# Altium footprint library SYNCBOX_TST.PcbLib: 267 footprints (part 5 of 17)
Each footprint in its own frame and in the unit in brackets; x right, y up, seen from the top. Pads: shape width x height; smd on the part's side, far side on the other; paste and mask are expansions set on the pad; w line width, h text height; cw(c..) or ccw(c..) is an arc to the next point about the centre after c.
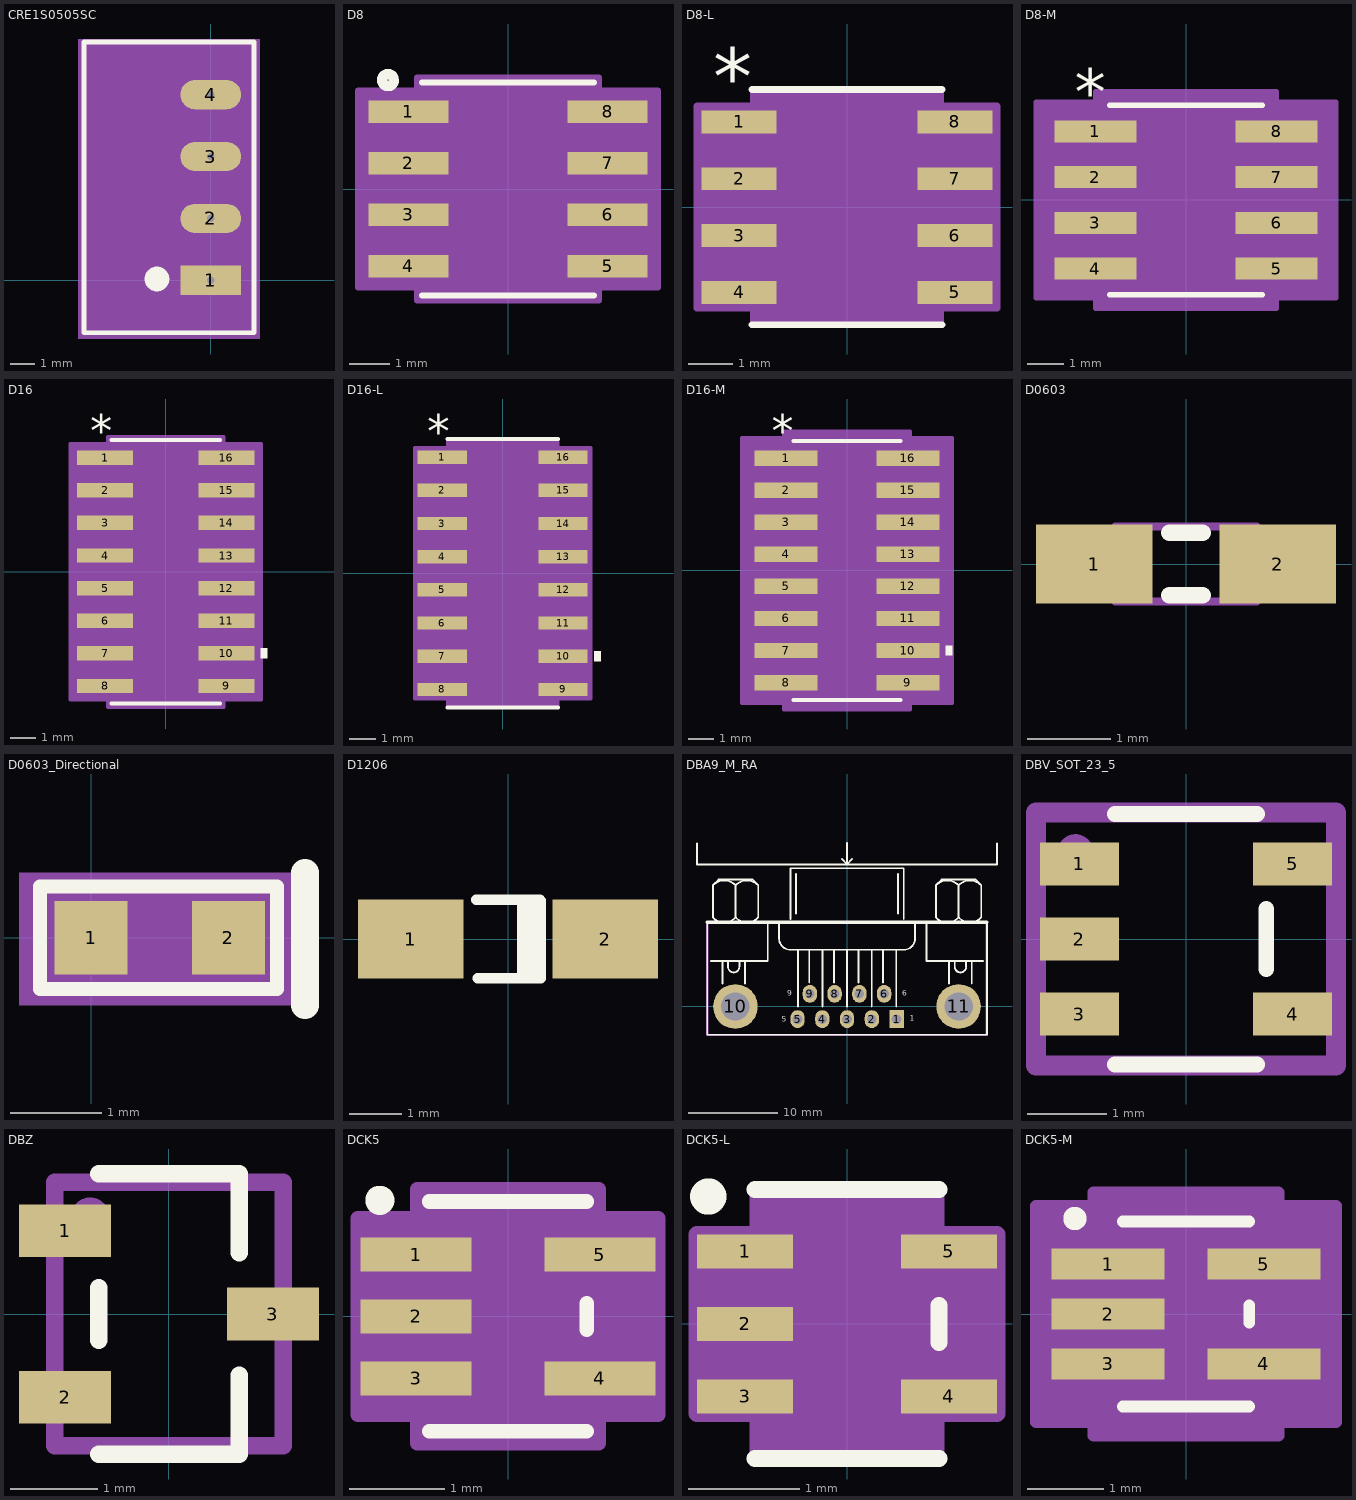
[diagram p4: the footprints below, top view; thin cyan lines are the x and y axes]

## CRE1S0505SC [mm]
pads (4):
  rect 2.5x1.2 hole 0.3 square: 1(0,0)
  oval 2.5x1.2 hole 0.3 square: 2(0,2.54) 3(0,5.08) 4(0,7.62)
Top Overlay:
  circle w0.508: c-2.21,0.051 r0.254
  lines w0.2: -5.207,-2.159 1.778,-2.159 1.778,9.779 -5.207,9.779 -5.207,-2.159
Mechanical 15:
  rectangle: -5.461,-2.413 2.032,9.906
3D body "mps_dcdc_cre1s_sc_a.step": height 10.19, standoff -3.91, extent -4.953,-2.209 1.167,9.321

## D8 [mil]
pads (8):
  rect 78x22 smd paste+0 mask+0: 1(-97,75) 2(-97,25) 3(-97,-25) 4(-97,-75) 5(97,-75) 6(97,-25) 7(97,25) 8(97,75)
Top Overlay:
  lines w6: -83.5,-103.5 83.5,-103.5 ; -83.5,103.5 83.5,103.5
  lines w10: -111.62,108.61 ccw(c-116.83,106) -111,106
Mechanical 13:
  lines w0: -12,98.5 ccw(c0,98.5) 12,98.5
  lines w1: -122,-85 -78.5,-85 -78.5,-65 -122,-65 -122,-85 ; -122,-35 -78.5,-35 -78.5,-15 -122,-15 -122,-35 ; -122,15 -78.5,15 -78.5,35 -122,35 -122,15 ; -122,65 -78.5,65 -78.5,85 -122,85 -122,65 ; -78.5,-98.5 -78.5,98.5 78.5,98.5 78.5,-98.5 -78.5,-98.5 ; 78.5,-85 122,-85 122,-65 78.5,-65 78.5,-85 ; 78.5,-35 122,-35 122,-15 78.5,-15 78.5,-35 ; 78.5,15 122,15 122,35 78.5,35 78.5,15 ; 78.5,65 122,65 122,85 78.5,85 78.5,65
  text "*" at -76,45.5 h50
Mechanical 15:
  region: -88.5,-96 -146,-96 -146,96 -88.5,96 -88.5,108.5 88.5,108.5 88.5,96 146,96 146,-96 88.5,-96 88.5,-108.5 -88.5,-108.5
  lines w6: -146,-96 -88.5,-96 -88.5,-108.5 88.5,-108.5 88.5,-96 146,-96 146,96 88.5,96 88.5,108.5 -88.5,108.5 -88.5,96 -146,96 -146,-96
3D body: height 10, standoff 0, extent 0,0 10,10
3D body "D8.step": height 69.09, standoff 0, extent -122,-98.5 122.01,98.51

## D8-L [mil]
pads (8):
  rect 66x20 smd paste+0 mask+0: 1(-95,75) 2(-95,25) 3(-95,-25) 4(-95,-75) 5(95,-75) 6(95,-25) 7(95,25) 8(95,75)
Top Overlay:
  lines w6: -83.5,-103.5 83.5,-103.5 ; -83.5,103.5 83.5,103.5
  text "*" at -117.5,90 h50
Mechanical 13:
  lines w0: -12,98.5 ccw(c0,98.5) 12,98.5
  lines w1: -122,-85 -122,-65 -78.5,-65 -78.5,-85 -122,-85 ; -122,-35 -122,-15 -78.5,-15 -78.5,-35 -122,-35 ; -122,15 -122,35 -78.5,35 -78.5,15 -122,15 ; -122,65 -122,85 -78.5,85 -78.5,65 -122,65 ; -78.5,-98.5 78.5,-98.5 78.5,98.5 -78.5,98.5 -78.5,-98.5 ; 78.5,-85 78.5,-65 122,-65 122,-85 78.5,-85 ; 78.5,-35 78.5,-15 122,-15 122,-35 78.5,-35 ; 78.5,15 78.5,35 122,35 122,15 78.5,15 ; 78.5,65 78.5,85 122,85 122,65 78.5,65
  text "*" at -76,45.5 h50
Mechanical 15:
  region: -82.5,-89 -132,-89 -132,89 -82.5,89 -82.5,102.5 82.5,102.5 82.5,89 132,89 132,-89 82.5,-89 82.5,-102.5 -82.5,-102.5
  lines w6: -132,-89 -132,89 -82.5,89 -82.5,102.5 82.5,102.5 82.5,89 132,89 132,-89 82.5,-89 82.5,-102.5 -82.5,-102.5 -82.5,-89 -132,-89
3D body "D8-L.step": height 69.09, standoff 0, extent -122,-98.5 122.01,98.51
3D body: height 10, standoff 0, extent 0,0 10,10

## D8-M [mil]
pads (8):
  rect 90x24 smd paste+0 mask+0: 1(-99,75) 2(-99,25) 3(-99,-25) 4(-99,-75) 5(99,-75) 6(99,-25) 7(99,25) 8(99,75)
Top Overlay:
  lines w6: -83.5,-103.5 83.5,-103.5 ; -83.5,103.5 83.5,103.5
  text "*" at -121.5,94 h50
Mechanical 13:
  lines w0: -12,98.5 ccw(c0,98.5) 12,98.5
  lines w1: -122,-85 -78.5,-85 -78.5,-65 -122,-65 -122,-85 ; -122,-35 -78.5,-35 -78.5,-15 -122,-15 -122,-35 ; -122,15 -78.5,15 -78.5,35 -122,35 -122,15 ; -122,65 -78.5,65 -78.5,85 -122,85 -122,65 ; -78.5,-98.5 -78.5,98.5 78.5,98.5 78.5,-98.5 -78.5,-98.5 ; 78.5,-85 122,-85 122,-65 78.5,-65 78.5,-85 ; 78.5,-35 122,-35 122,-15 78.5,-15 78.5,-35 ; 78.5,15 122,15 122,35 78.5,35 78.5,15 ; 78.5,65 122,65 122,85 78.5,85 78.5,65
  text "*" at -76,45.5 h50
Mechanical 15:
  region: -98.5,-107 -164,-107 -164,107 -98.5,107 -98.5,118.5 98.5,118.5 98.5,107 164,107 164,-107 98.5,-107 98.5,-118.5 -98.5,-118.5
  lines w6: -164,-107 -98.5,-107 -98.5,-118.5 98.5,-118.5 98.5,-107 164,-107 164,107 98.5,107 98.5,118.5 -98.5,118.5 -98.5,107 -164,107 -164,-107
3D body: height 10, standoff 0, extent 0,0 10,10
3D body "D8-M.step": height 69.09, standoff 0, extent -122,-98.5 122.01,98.51

## D16 [mil]
pads (16):
  rect 86x22 smd paste+0 mask+0: 1(-93,175) 2(-93,125) 3(-93,75) 4(-93,25) 5(-93,-25) 6(-93,-75) 7(-93,-125) 8(-93,-175) 9(93,-175) 10(93,-125) 11(93,-75) 12(93,-25) 13(93,25) 14(93,75) 15(93,125) 16(93,175)
Top Overlay:
  region: 146,-117.5 156,-117.5 156,-132.5 146,-132.5
  lines w6: -83.5,-202 83.5,-202 ; -83.5,202 83.5,202
  text "*" at -115.5,192 h50
Mechanical 13:
  lines w0: -12,197 ccw(c0,197) 12,197
  lines w1: -122,-185 -122,-165 -78.5,-165 -78.5,-185 -122,-185 ; -122,-135 -122,-115 -78.5,-115 -78.5,-135 -122,-135 ; -122,-85 -122,-65 -78.5,-65 -78.5,-85 -122,-85 ; -122,-35 -122,-15 -78.5,-15 -78.5,-35 -122,-35 ; -122,15 -122,35 -78.5,35 -78.5,15 -122,15 ; -122,65 -122,85 -78.5,85 -78.5,65 -122,65 ; -122,115 -122,135 -78.5,135 -78.5,115 -122,115 ; -122,165 -122,185 -78.5,185 -78.5,165 -122,165 ; -78.5,-197 78.5,-197 78.5,197 -78.5,197 -78.5,-197 ; 78.5,-185 78.5,-165 122,-165 122,-185 78.5,-185 ; 78.5,-135 78.5,-115 122,-115 122,-135 78.5,-135 ; 78.5,-85 78.5,-65 122,-65 122,-85 78.5,-85 ; 78.5,-35 78.5,-15 122,-15 122,-35 78.5,-35 ; 78.5,15 78.5,35 122,35 122,15 78.5,15 ; 78.5,65 78.5,85 122,85 122,65 78.5,65 ; 78.5,115 78.5,135 122,135 122,115 78.5,115 ; 78.5,165 78.5,185 122,185 122,165 78.5,165
  text "*" at -76,144 h50
Mechanical 15:
  region: -88.5,-196 -146,-196 -146,196 -88.5,196 -88.5,207 88.5,207 88.5,196 146,196 146,-196 88.5,-196 88.5,-207 -88.5,-207
  lines w6: -146,-196 -146,196 -88.5,196 -88.5,207 88.5,207 88.5,196 146,196 146,-196 88.5,-196 88.5,-207 -88.5,-207 -88.5,-196 -146,-196
3D body: height 10, standoff 0, extent 0,0 10,10
3D body "D16.stp": height 69.09, standoff 0, extent -122.01,-197.01 122.01,197.01

## D16-L [mil]
pads (16):
  rect 74x20 smd paste+0 mask+0: 1(-91,175) 2(-91,125) 3(-91,75) 4(-91,25) 5(-91,-25) 6(-91,-75) 7(-91,-125) 8(-91,-175) 9(91,-175) 10(91,-125) 11(91,-75) 12(91,-25) 13(91,25) 14(91,75) 15(91,125) 16(91,175)
Top Overlay:
  region: 138,-117.5 148,-117.5 148,-132.5 138,-132.5
  lines w6: -83.5,-202 83.5,-202 ; -83.5,202 83.5,202
  text "*" at -113.5,190 h50
Mechanical 13:
  lines w0: -12,197 ccw(c0,197) 12,197
  lines w1: -122,-185 -122,-165 -78.5,-165 -78.5,-185 -122,-185 ; -122,-135 -122,-115 -78.5,-115 -78.5,-135 -122,-135 ; -122,-85 -122,-65 -78.5,-65 -78.5,-85 -122,-85 ; -122,-35 -122,-15 -78.5,-15 -78.5,-35 -122,-35 ; -122,15 -122,35 -78.5,35 -78.5,15 -122,15 ; -122,65 -122,85 -78.5,85 -78.5,65 -122,65 ; -122,115 -122,135 -78.5,135 -78.5,115 -122,115 ; -122,165 -122,185 -78.5,185 -78.5,165 -122,165 ; -78.5,-197 78.5,-197 78.5,197 -78.5,197 -78.5,-197 ; 78.5,-185 78.5,-165 122,-165 122,-185 78.5,-185 ; 78.5,-135 78.5,-115 122,-115 122,-135 78.5,-135 ; 78.5,-85 78.5,-65 122,-65 122,-85 78.5,-85 ; 78.5,-35 78.5,-15 122,-15 122,-35 78.5,-35 ; 78.5,15 78.5,35 122,35 122,15 78.5,15 ; 78.5,65 78.5,85 122,85 122,65 78.5,65 ; 78.5,115 78.5,135 122,135 122,115 78.5,115 ; 78.5,165 78.5,185 122,185 122,165 78.5,165
  text "*" at -76,144 h50
Mechanical 15:
  region: -82.5,-189 -132,-189 -132,189 -82.5,189 -82.5,201 82.5,201 82.5,189 132,189 132,-189 82.5,-189 82.5,-201 -82.5,-201
  lines w6: -132,-189 -132,189 -82.5,189 -82.5,201 82.5,201 82.5,189 132,189 132,-189 82.5,-189 82.5,-201 -82.5,-201 -82.5,-189 -132,-189
3D body "D16-L.stp": height 69.09, standoff 0, extent -122,-197 122.01,197.01
3D body: height 10, standoff 0, extent 0,0 10,10

## D16-M [mil]
pads (16):
  rect 98x24 smd paste+0 mask+0: 1(-95,175) 2(-95,125) 3(-95,75) 4(-95,25) 5(-95,-25) 6(-95,-75) 7(-95,-125) 8(-95,-175) 9(95,-175) 10(95,-125) 11(95,-75) 12(95,-25) 13(95,25) 14(95,75) 15(95,125) 16(95,175)
Top Overlay:
  region: 154,-117.5 164,-117.5 164,-132.5 154,-132.5
  lines w6: -83.5,-202 83.5,-202 ; -83.5,202 83.5,202
  text "*" at -117.5,194 h50
Mechanical 13:
  lines w0: -12,197 ccw(c0,197) 12,197
  lines w1: -122,-185 -78.5,-185 -78.5,-165 -122,-165 -122,-185 ; -122,-135 -78.5,-135 -78.5,-115 -122,-115 -122,-135 ; -122,-85 -78.5,-85 -78.5,-65 -122,-65 -122,-85 ; -122,-35 -78.5,-35 -78.5,-15 -122,-15 -122,-35 ; -122,15 -78.5,15 -78.5,35 -122,35 -122,15 ; -122,65 -78.5,65 -78.5,85 -122,85 -122,65 ; -122,115 -78.5,115 -78.5,135 -122,135 -122,115 ; -122,165 -78.5,165 -78.5,185 -122,185 -122,165 ; -78.5,-197 -78.5,197 78.5,197 78.5,-197 -78.5,-197 ; 78.5,-185 122,-185 122,-165 78.5,-165 78.5,-185 ; 78.5,-135 122,-135 122,-115 78.5,-115 78.5,-135 ; 78.5,-85 122,-85 122,-65 78.5,-65 78.5,-85 ; 78.5,-35 122,-35 122,-15 78.5,-15 78.5,-35 ; 78.5,15 122,15 122,35 78.5,35 78.5,15 ; 78.5,65 122,65 122,85 78.5,85 78.5,65 ; 78.5,115 122,115 122,135 78.5,135 78.5,115 ; 78.5,165 122,165 122,185 78.5,185 78.5,165
  text "*" at -76,144 h50
Mechanical 15:
  region: -98.5,-207 -164,-207 -164,207 -98.5,207 -98.5,217 98.5,217 98.5,207 164,207 164,-207 98.5,-207 98.5,-217 -98.5,-217
  lines w6: -164,-207 -98.5,-207 -98.5,-217 98.5,-217 98.5,-207 164,-207 164,207 98.5,207 98.5,217 -98.5,217 -98.5,207 -164,207 -164,-207
3D body: height 10, standoff 0, extent 0,0 10,10
3D body "D16-M.stp": height 69.09, standoff 0, extent -122,-197 122.01,197.01

## D0603 [mm]
height 0.8
pads (2):
  rect 1.4x0.95 smd: 1(-1.1,0) 2(1.1,0)
Top Overlay:
  lines w0.2: -0.2,-0.375 0.2,-0.375 ; -0.2,0.375 0.2,0.375
Mechanical 13:
  lines w0.1: -0.85,-0.45 0.85,-0.45 0.85,0.45 -0.85,0.45 -0.85,-0.45
3D body: height 0.55, standoff 0, extent -0.85,-0.45 0.85,0.45

## D0603_Directional [mm] "0603 Case Diode"
pads (2):
  rect 0.8x0.8 smd: 1(0,0) 2(1.5,0)
Top Overlay:
  lines w0.152: -0.559,-0.559 -0.559,0.559 2.032,0.559 2.032,-0.559 -0.559,-0.559
  lines w0.305: 2.337,-0.737 2.337,0.711
Mechanical 15:
  rectangle: -0.787,-0.737 2.489,0.711
Mechanical 29:
  text ".Designator" at -0.508,-0.229 h1.52
3D body "APT1608.STEP": height 0.75, standoff 0, extent -0.09,-0.374 1.521,0.426

## D1206 [mm]
height 1.85
pads (2):
  rect 2x1.5 smd: 1(-1.85,0) 2(1.85,0)
Top Overlay:
  lines w0.2: -0.6,0.75 0.6,0.75 0.625,0.725 0.625,-0.75 -0.575,-0.75 ; 0.275,-0.65 0.275,0.7 ; 0.425,-0.725 0.425,0.7
3D body: height 1.85, standoff 0, extent -1.7,-0.9 1.7,0.9

## DBA9_M_RA [mm]
pads (11):
  rect 1.6x2 hole 1.09: 1(5.556,-1.418)
  oval 1.6x2 hole 1.09: 2(2.783,-1.418) 3(0.011,-1.418) 4(-2.762,-1.418) 5(-5.535,-1.418) 6(4.159,1.418) 7(1.386,1.418) 8(-1.386,1.418) 9(-4.159,1.418)
  round 5 hole 3.18: 10(-12.499,0) 11(12.499,0)
Top Overlay:
  lines w0.2: -16.8,15.9 -16.8,18.25 ; -0.6,16.55 0,15.95 ; 0,18.3 0,15.95 ; 0.6,16.55 0,15.95 ; 16.8,15.9 16.8,18.25
  lines w0.203: -16.8,15.9 16.8,15.9 ; -15.653,9.418 -15.653,-3.175 15.674,-3.175 15.674,9.418 ; -15.229,5.08 -8.879,5.08 -8.879,9.518 ; -15.02,9.974 ccw(c-13.748,11.247) -12.476,9.974 ; -15.02,13.577 cw(c-13.748,12.305) -12.476,13.577 ; -14.383,9.342 -15.018,9.977 -15.018,13.575 -14.383,14.21 -10.573,14.21 -9.938,13.575 -9.938,9.977 -10.573,9.342 ; -13.959,2.54 -13.959,5.08 ; -13.324,5.08 -13.324,4.445 ccw(c-12.689,4.445) -12.054,4.445 -12.054,5.08 ; -12.48,9.974 ccw(c-11.208,11.247) -9.936,9.974 ; -12.48,13.577 cw(c-11.208,12.305) -9.936,13.577 ; -12.478,9.977 -12.478,13.575 ; -11.419,2.54 -11.419,5.08 ; -7.609,9.418 -7.609,7.62 ccw(c-6.339,7.62) -6.339,6.35 6.361,6.35 ccw(c6.361,7.62) 7.631,7.62 7.631,9.518 ; -6.339,9.765 -6.339,15.48 6.361,15.48 6.361,9.765 ; -5.704,10.4 -5.704,14.845 ; -5.493,0 -5.493,6.35 ; -4.223,2.7 -4.223,6.35 ; -2.741,0 -2.741,6.35 ; -1.471,2.7 -1.471,6.35 ; 0.011,0 0.011,6.35 ; 1.281,2.7 1.281,6.35 ; 2.762,0 2.762,6.35 ; 4.032,2.7 4.032,6.35 ; 5.514,0 5.514,6.35 ; 5.726,10.4 5.726,14.845 ; 8.901,9.418 8.901,5.08 15.251,5.08 ; 9.957,9.974 ccw(c11.229,11.247) 12.501,9.974 ; 9.957,13.577 cw(c11.229,12.305) 12.501,13.577 ; 10.594,9.342 9.959,9.977 9.959,13.575 10.594,14.21 14.404,14.21 15.039,13.575 15.039,9.977 14.404,9.342 ; 11.441,2.54 11.441,5.08 ; 12.076,5.08 12.076,4.445 ccw(c12.711,4.445) 13.346,4.445 13.346,5.08 ; 12.497,9.974 ccw(c13.769,11.247) 15.041,9.974 ; 12.497,13.577 cw(c13.769,12.305) 15.041,13.577 ; 12.499,9.977 12.499,13.575 ; 13.981,2.54 13.981,5.08
  lines w0.4: -15.653,9.418 15.674,9.418
  text "6" at 6.2,1.2 h0.6
  text "1" at 7,-1.6 h0.6
  text "5" at -7.3,-1.7 h0.6
  text "9" at -6.7,1.2 h0.6
Mechanical 16:
  lines w0.254: -15.641,-3.182 15.659,-3.182 15.659,9.418 -15.641,9.418 -15.641,-3.182
Mechanical 29:
  text ".Designator" at -2.1,1.2 h1.52
3D body "c-1734351-1-a-3d.stp": height 12.45, standoff -4.15, extent -15.4,-2.9 15.4,15.5

## DBV_SOT_23_5 [mm]
pads (5):
  rect 1x0.55 smd: 1(-1.35,0.95) 2(-1.35,0) 3(-1.35,-0.95) 4(1.35,-0.95) 5(1.35,0.95)
Top Overlay:
  lines w0.2: -0.9,-1.59 0.9,-1.59 ; -0.9,1.585 0.9,1.585 ; 1.016,-0.381 1.016,0.381
Mechanical 16:
  circle w0.254: c-1.4,1.1 r0.1
  lines w0.254: -1.9,-1.6 -1.9,1.6 1.9,1.6 1.9,-1.6 -1.9,-1.6
Mechanical 29:
  text ".Designator" at -0.5,-0.3 h0.6
3D body: height 0.5, standoff 0, extent 1.143,-1.27 1.778,-0.635
3D body: height 0.5, standoff 0, extent 1.143,0.635 1.778,1.27
3D body: height 0.5, standoff 0, extent -1.651,-0.318 -1.016,0.318
3D body: height 0.5, standoff 0, extent -1.651,-1.27 -1.016,-0.635
3D body: height 0.5, standoff 0, extent -1.651,0.635 -1.016,1.27
3D body: height 1.45, standoff 0, extent -1,-1.69 1.116,1.685

## DBZ [mm]
pads (3):
  rect 1.05x0.6 smd mask+0.07: 1(-1.185,0.95) 2(-1.185,-0.95) 3(1.185,0)
Top Overlay:
  lines w0.2: -0.8,-1.6 0.8,-1.6 0.8,-0.7 ; -0.8,-0.3 -0.8,0.3 ; -0.8,1.6 0.8,1.6 0.8,0.7
Mechanical 16:
  circle w0.254: c-0.9,1.1 r0.1
  lines w0.2: -1.3,-1.5 -1.3,1.5 1.3,1.5 1.3,-1.5 -1.3,-1.5
Mechanical 29:
  text ".Designator" at -0.3,0.7 h0.6
3D body "mf03a.stp": height 0.97, standoff -0.01, extent -1.257,-1.461 1.257,1.46

## DCK5 [mil]
pads (5):
  rect 46x14 smd paste+0 mask+0: 1(-38,25.59) 2(-38,0) 3(-38,-25.59) 4(38,-25.59) 5(38,25.59)
Top Overlay:
  circle w10: c-53,48 r1
  lines w6: -32.5,-47.5 32.5,-47.5 ; -32.5,47.5 32.5,47.5 ; 32.5,-5.49 32.5,5.49
Mechanical 13:
  lines w0: -12,42.5 ccw(c0,42.5) 12,42.5
  lines w1: -47,-31.59 -27.5,-31.59 -27.5,-19.59 -47,-19.59 -47,-31.59 ; -47,-6 -27.5,-6 -27.5,6 -47,6 -47,-6 ; -47,19.59 -27.5,19.59 -27.5,31.59 -47,31.59 -47,19.59 ; -27.5,-42.5 -27.5,42.5 27.5,42.5 27.5,-42.5 -27.5,-42.5 ; 27.5,-31.59 47,-31.59 47,-19.59 27.5,-19.59 27.5,-31.59 ; 27.5,19.59 47,19.59 47,31.59 27.5,31.59 27.5,19.59
  text "*" at -30,-3.41 h50
Mechanical 15:
  region: 37.5,-52.5 -37.5,-52.5 -37.5,-40.59 -62,-40.59 -62,40.59 -37.5,40.59 -37.5,52.5 37.5,52.5 37.5,40.59 62,40.59 62,-40.59 37.5,-40.59
  lines w6: -62,-40.59 -62,40.59 -37.5,40.59 -37.5,52.5 37.5,52.5 37.5,40.59 62,40.59 62,-40.59 37.5,-40.59 37.5,-52.5 -37.5,-52.5 -37.5,-40.59 -62,-40.59
3D body: height 19.68, standoff 0, extent 35,-30 55,-20
3D body: height 19.68, standoff 0, extent 35,20 55,30
3D body: height 19.68, standoff 0, extent -55,-30 -35,-20
3D body: height 19.68, standoff 0, extent -55,-5 -35,5
3D body: height 19.68, standoff 0, extent -55,20 -35,30
3D body: height 57.09, standoff 0, extent -35,-45 35,50
3D body: height 10, standoff 0, extent 0,0 10,10

## DCK5-L [mil]
pads (5):
  rect 34x12 smd paste+0 mask+0: 1(-36,25.59) 2(-36,0) 3(-36,-25.59) 4(36,-25.59) 5(36,25.59)
Top Overlay:
  circle w10: c-49,45 r1.41
  lines w6: -32.5,-47.5 32.5,-47.5 ; -32.5,47.5 32.5,47.5 ; 32.5,-6.49 32.5,6.49
Mechanical 13:
  lines w0: -12,42.5 ccw(c0,42.5) 12,42.5
  lines w1: -47,-31.59 -27.5,-31.59 -27.5,-19.59 -47,-19.59 -47,-31.59 ; -47,-6 -27.5,-6 -27.5,6 -47,6 -47,-6 ; -47,19.59 -27.5,19.59 -27.5,31.59 -47,31.59 -47,19.59 ; -27.5,-42.5 -27.5,42.5 27.5,42.5 27.5,-42.5 -27.5,-42.5 ; 27.5,-31.59 47,-31.59 47,-19.59 27.5,-19.59 27.5,-31.59 ; 27.5,19.59 47,19.59 47,31.59 27.5,31.59 27.5,19.59
  text "*" at -30,-5.41 h50
Mechanical 15:
  region: 31.5,-46.5 -31.5,-46.5 -31.5,-31.59 -53,-31.59 -53,31.59 -31.5,31.59 -31.5,46.5 31.5,46.5 31.5,31.59 53,31.59 53,-31.59 31.5,-31.59
  lines w6: -53,-31.59 -53,31.59 -31.5,31.59 -31.5,46.5 31.5,46.5 31.5,31.59 53,31.59 53,-31.59 31.5,-31.59 31.5,-46.5 -31.5,-46.5 -31.5,-31.59 -53,-31.59
3D body: height 10, standoff 0, extent 0,0 10,10
3D body: height 9.84, standoff 0, extent -50,20 -30,30
3D body: height 9.84, standoff 0, extent -50,-5 -30,5
3D body: height 9.84, standoff 0, extent -50,-30 -30,-20
3D body: height 9.84, standoff 0, extent 25,20 45,30
3D body: height 9.84, standoff 0, extent 25,-30 45,-20
3D body: height 39.37, standoff 0, extent -30,-40 25,45

## DCK5-M [mil]
pads (5):
  rect 58x16 smd paste+0 mask+0: 1(-40,25.59) 2(-40,0) 3(-40,-25.59) 4(40,-25.59) 5(40,25.59)
Top Overlay:
  circle w10: c-57,49 r1
  lines w6: -32.5,-47.5 32.5,-47.5 ; -32.5,47.5 32.5,47.5 ; 32.5,-4.49 32.5,4.49
Mechanical 13:
  lines w0: -12,42.5 ccw(c0,42.5) 12,42.5
  lines w1: -47,-31.59 -27.5,-31.59 -27.5,-19.59 -47,-19.59 -47,-31.59 ; -47,-6 -27.5,-6 -27.5,6 -47,6 -47,-6 ; -47,19.59 -27.5,19.59 -27.5,31.59 -47,31.59 -47,19.59 ; -27.5,-42.5 -27.5,42.5 27.5,42.5 27.5,-42.5 -27.5,-42.5 ; 27.5,-31.59 47,-31.59 47,-19.59 27.5,-19.59 27.5,-31.59 ; 27.5,19.59 47,19.59 47,31.59 27.5,31.59 27.5,19.59
  text "*" at -30,-1.41 h50
Mechanical 15:
  region: 47.5,-62.5 -47.5,-62.5 -47.5,-55.59 -77,-55.59 -77,55.59 -47.5,55.59 -47.5,62.5 47.5,62.5 47.5,55.59 77,55.59 77,-55.59 47.5,-55.59
  lines w6: -77,-55.59 -77,55.59 -47.5,55.59 -47.5,62.5 47.5,62.5 47.5,55.59 77,55.59 77,-55.59 47.5,-55.59 47.5,-62.5 -47.5,-62.5 -47.5,-55.59 -77,-55.59
3D body: height 10, standoff 0, extent 0,0 10,10
3D body: height 37.4, standoff 0, extent -25,-40 25,40
3D body: height 9.84, standoff 0, extent -65,20 -25,30
3D body: height 9.84, standoff 0, extent -65,-5 -25,5
3D body: height 9.84, standoff 0, extent -65,-30 -25,-20
3D body: height 9.84, standoff 0, extent 25,-30 65,-20
3D body: height 9.84, standoff 0, extent 25,20 65,30